# Altium footprint library new-version2.PcbLib: 88 footprints (part 5 of 6)
Each footprint in its own frame and in the unit in brackets; x right, y up, seen from the top. Pads: shape width x height; smd on the part's side, far side on the other; paste and mask are expansions set on the pad; w line width, h text height; cw(c..) or ccw(c..) is an arc to the next point about the centre after c.
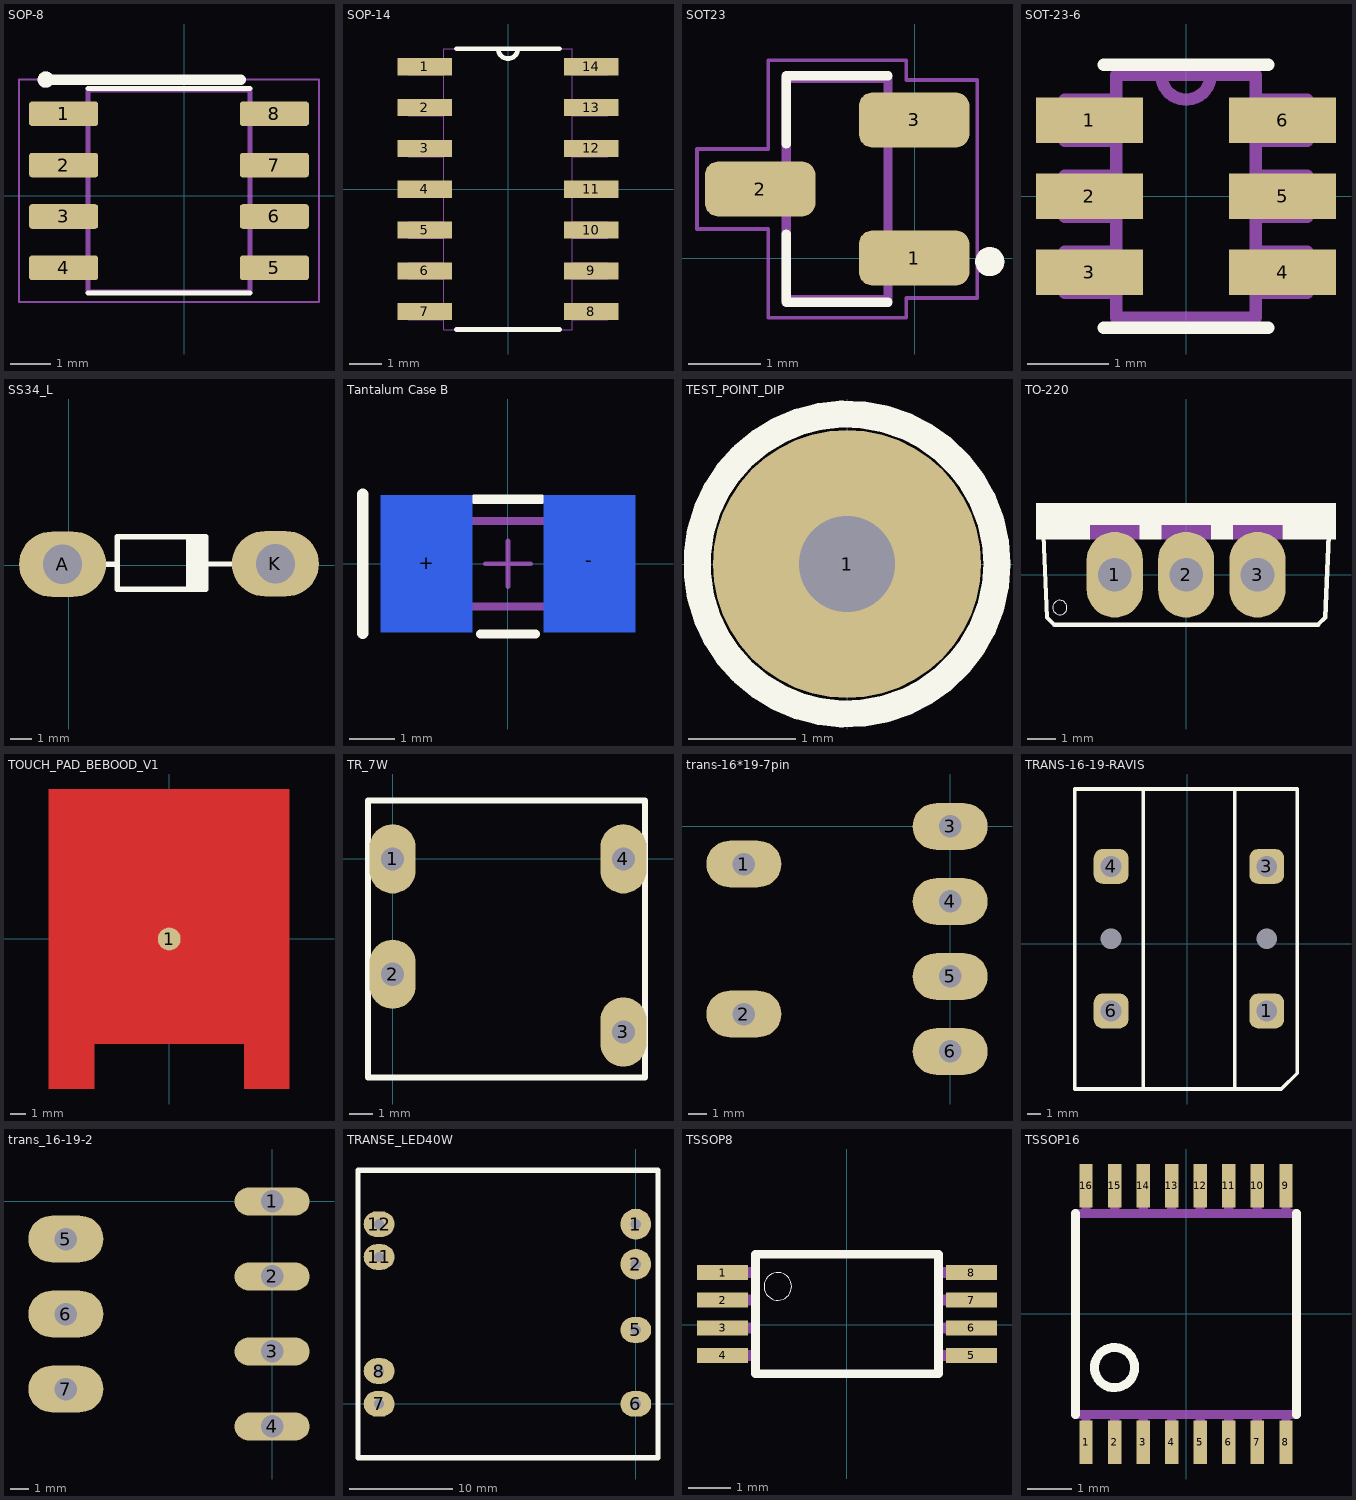
[diagram p4: the footprints below, top view; thin cyan lines are the x and y axes]

## SOP-8 [mm]
pads (8):
  rrect25% 1.71x0.61 smd: 1(-2.986,2.032) 2(-2.986,0.762) 3(-2.986,-0.508) 4(-2.986,-1.778) 5(2.224,-1.778) 6(2.224,-0.508) 7(2.224,0.762) 8(2.224,2.032)
Top Overlay:
  circle w0.2: c-3.429,2.877 r0.1
  lines w0.127: -2.381,-2.403 1.619,-2.403 ; -2.381,2.657 1.619,2.657
  lines w0.254: -3.429,2.877 1.399,2.877
Mechanical 13:
  circle w0.2: c-3.429,2.877 r0.1
  lines w0.127: -2.381,-2.373 -2.381,2.627 1.619,2.627 1.619,-2.373 -2.381,-2.373
Mechanical 15:
  lines w0.05: -4.091,-2.623 -4.091,2.877 3.329,2.877 3.329,-2.623 -4.091,-2.623
3D body "step_temp.STEP": height 1.75, standoff 0, extent -3.381,-2.323 2.619,2.577

## SOP-14 [mil]
pads (14):
  rect 67x21 smd: 1(-102,150) 2(-102,100) 3(-102,50) 4(-102,0) 5(-102,-50) 6(-102,-100) 7(-102,-150) 8(102,-150) 9(102,-100) 10(102,-50) 11(102,0) 12(102,50) 13(102,100) 14(102,150)
Top Overlay:
  lines w6: -63,-172 63,-172 ; -63,172 -12,172 ; 63,172 12,172 ; -12,172 ccw(c0,172) 12,172 ; -12,172 12,172
Mechanical 13:
  lines w0: -12,172 ccw(c0,172) 12,172 ; -12,172 -79,172 -79,-172 79,-172 79,172 12,172 ; -12,172 12,172 ; -122,-160 -79,-160 -79,-140 -122,-140 -122,-160 ; -122,-110 -79,-110 -79,-90 -122,-90 -122,-110 ; -122,-60 -79,-60 -79,-40 -122,-40 -122,-60 ; -122,-10 -79,-10 -79,10 -122,10 -122,-10 ; -122,40 -79,40 -79,60 -122,60 -122,40 ; -122,90 -79,90 -79,110 -122,110 -122,90 ; -122,140 -79,140 -79,160 -122,160 -122,140 ; 79,-160 122,-160 122,-140 79,-140 79,-160 ; 79,-110 122,-110 122,-90 79,-90 79,-110 ; 79,-60 122,-60 122,-40 79,-40 79,-60 ; 79,-10 122,-10 122,10 79,10 79,-10 ; 79,40 122,40 122,60 79,60 79,40 ; 79,90 122,90 122,110 79,110 79,90 ; 79,140 122,140 122,160 79,160 79,140
3D body "step_temp.STEP": height 68.9, standoff 0, extent -118.11,-170.28 118.11,170.28

## SOT23 [mil]
pads (3):
  rrect50% 60x30 smd: 1(-0.24,0) 2(-83.7,37.4) 3(-0.24,74.8)
Top Overlay:
  circle w7.87: c40.71,-1.97 r3.94
  lines w5: -69.53,12.99 -69.53,-24.02 -14.41,-24.02 ; -69.53,61.81 -69.53,98.82 -14.41,98.82
Mechanical 13:
  circle w7.87: c40.71,-1.97 r3.94
  lines w5: -69.53,-22.44 -14.41,-22.44 -14.41,97.24 -69.53,97.24 -69.53,-22.44
Mechanical 15:
  lines w1.97: -117.95,15.75 -79.37,15.75 -79.37,-32.28 -4.57,-32.28 -4.57,-21.65 34.02,-21.65 34.02,96.46 -4.57,96.46 -4.57,107.09 -79.37,107.09 -79.37,59.06 -117.95,59.06 -117.95,15.75
3D body "SOT23.STEP": height 44.09, standoff 0, extent -85.51,-18.74 7.01,96.22

## SOT-23-6 [mil]
pads (6):
  rect 52x22 smd: 1(-47,37) 2(-47,0) 3(-47,-37) 4(47,-37) 5(47,0) 6(47,37)
Top Overlay:
  lines w6: -40,-64 40,-64 ; -40,64 40,64
Mechanical 13:
  lines w6: -12,59 ccw(c0,59) 12,59 ; -12,59 12,59 ; -12,59 -34,59 -34,-59 34,-59 34,59 12,59 ; -59,-47 -59,-27 -34,-27 -34,-47 -59,-47 ; -59,-10 -59,10 -34,10 -34,-10 -59,-10 ; -59,27 -59,47 -34,47 -34,27 -59,27 ; 34,-47 34,-27 59,-27 59,-47 34,-47 ; 34,-10 34,10 59,10 59,-10 34,-10 ; 34,27 34,47 59,47 59,27 34,27
3D body "step_temp.STEP": height 57.09, standoff 0, extent -55.12,-57.09 55.12,57.09

## SS34_L [mm]
pads (2):
  oval 4x3 hole 1.8: A(-0.276,0.055) K(9.5,0.076)
Top Overlay:
  region: 6.29,1.315 5.401,1.315 5.401,-1.098 6.29,-1.098
  lines w0.254: -0.938,0.055 2.226,0.055 ; 2.988,1.315 2.226,1.315 ; 5.822,0.057 9.5,0.076 ; 2.226,1.315 2.226,-1.098 6.29,-1.098 6.29,1.315 2.226,1.315

## Tantalum Case B [mm]
pads (2):
  rect 2x3 smd far side: +(-1.782,0) -(1.782,0)
Top Overlay:
  lines w0.2: -0.731,1.41 0.731,1.41 ; -0.604,-1.537 0.604,-1.537
  lines w0.254: -3.175,-1.524 -3.175,1.524
Mechanical 13:
  lines w0.1: -1.7,-0.9 1.7,-0.9 1.7,0.9 -1.7,0.9 -1.7,-0.9
Mechanical 15:
  lines w0.1: -0.5,0 0.5,0 ; 0,-0.5 0,0.5 ; -2,-0.975 2,-0.975 2,0.975 -2,0.975 -2,-0.975

## TEST_POINT_DIP [mm]
pads (1):
  round 2.5 hole 0.9: 1(0,0)
Top Overlay:
  circle w0.254: c0,0 r1.4

## TO-220 [mm]
pads (3):
  oval 2x3.048 hole 1.2: 1(-2.541,-0.001) 2(-0.001,-0.001) 3(2.539,-0.001)
Top Overlay:
  circle w0: c-4.497,-1.169 r0.254
  region: 5.333,1.776 -5.345,1.776 -5.345,2.539 5.333,2.539
  region: -3.43,1.267 -5.341,1.267 -5.341,1.777 -3.43,1.777
  region: -0.89,1.267 -1.655,1.267 -1.655,1.777 -0.89,1.777
  region: 1.65,1.268 0.889,1.268 0.889,1.777 1.65,1.777
  region: 5.333,1.268 3.432,1.268 3.432,1.777 5.333,1.777
  lines w0.152: -5.081,1.396 -4.954,-1.525 -4.7,-1.779 4.698,-1.779 4.952,-1.525 5.079,1.396
Mechanical 13:
  region: -1.652,1.268 -3.434,1.268 -3.434,1.777 -1.652,1.777
  region: 0.888,1.269 -0.89,1.269 -0.89,1.777 0.888,1.777
  region: 3.428,1.269 1.651,1.269 1.651,1.777 3.428,1.777
3D body "TO-220.STEP": height 19.84, standoff -10.19, extent -5.108,-1.827 4.988,2.618

## TOUCH_PAD_BEBOOD_V1 [mil]
pads (1):
  round 60 smd: 1(0,-0.12)
Top Layer:
  region: -196.5,-393.7 -196.5,-275.59 196.34,-275.59 196.34,-393.7 314.69,-393.7 314.68,393.46 -316.02,393.47 -316.02,-393.7

## TR_7W [mm]
pads (4):
  oval 2x3 hole 1: 1(0,0) 2(0,-5) 3(10,-7.5) 4(10,0)
Top Overlay:
  lines w0.254: -1.066,-9.476 10.934,-9.476 10.934,2.529 -1.066,2.529 -1.066,-9.476

## trans-16*19-7pin [mm]
pads (6):
  oval 4x2.5 hole 1.2: 1(-11,-2) 2(-11,-10) 3(0,0) 4(0,-4) 5(0,-8) 6(0,-12)
Bottom Overlay:
  lines w0.254: -12.65,-14 1.35,-14 1.35,2 -12.65,2 -12.65,-14

## TRANS-16-19-RAVIS [mm]
pads (6):
  rrect50% 2.5x2.5 hole 1.5 mask+0: 1(5.715,-4.826) 3(5.715,5.574) 4(-5.485,5.574) 6(-5.485,-4.826)
  rrect50% 0x0 hole 1.5 unplated mask+0: 2(5.715,0.374) 5(-5.485,0.374)
Top Overlay:
  lines w0.254: -3.185,-10.442 -3.185,11.148 ; 3.41,-10.442 3.41,11.148 ; -8.096,-10.442 -8.096,11.148 7.906,11.148 7.906,-9.304 6.767,-10.442 -8.096,-10.442
3D body "User Library-EE-19V10P.x_t": height 19, standoff -4.5, extent -8.03,-10.499 7.97,11.501

## trans_16-19-2 [mm]
pads (7):
  oval 4x1.5 hole 1.2: 1(0,0) 2(0,-4) 3(0,-8) 4(0,-12)
  oval 4x2.5 hole 1.2: 5(-11,-2) 6(-11,-6) 7(-11,-10)
Bottom Overlay:
  lines w0.254: -12.65,-14 1.35,-14 1.35,2 -12.65,2 -12.65,-14

## TRANSE_LED40W [mm]
pads (8):
  round 3 hole 1: 1(0,17.5) 2(0,13.6)
  oval 3x2.5 hole 1: 5(0,7.2) 6(0,0) 7(-25,0) 8(-25,3.2) 11(-25,14.3) 12(-25,17.5)
Top Overlay:
  lines w0.5: -26.476,22.75 2.159,22.75 2.159,-5.25 -27.051,-5.25 -27.051,22.75 1.524,22.75

## TSSOP8 [mm]
pads (8):
  rect 1.2x0.35 smd: 1(-2.925,1.229) 2(-2.925,0.579) 3(-2.925,-0.071) 4(-2.925,-0.721) 5(2.925,-0.721) 6(2.925,-0.071) 7(2.925,0.579) 8(2.925,1.229)
Top Overlay:
  circle w0: c-1.625,0.904 r0.325
  lines w0.203: -2.15,-1.146 2.15,-1.146 2.15,1.654 -2.15,1.654 -2.15,-1.146
Mechanical 13:
  region: -2.2,1.104 -3.2,1.104 -3.2,1.354 -2.2,1.354
  region: -2.2,0.454 -3.201,0.454 -3.201,0.704 -2.2,0.704
  region: -2.2,-0.197 -3.206,-0.197 -3.206,0.054 -2.2,0.054
  region: -2.2,-0.846 -3.201,-0.846 -3.201,-0.596 -2.2,-0.596
  region: 3.2,-0.846 2.201,-0.846 2.201,-0.596 3.2,-0.596
  region: 3.2,-0.196 2.201,-0.196 2.201,0.054 3.2,0.054
  region: 3.2,0.454 2.203,0.454 2.203,0.704 3.2,0.704
  region: 3.2,1.105 2.201,1.105 2.201,1.354 3.2,1.354

## TSSOP16 [mil]
pads (16):
  rect 12x39 smd: 1(-89.57,-114.91) 2(-63.98,-114.91) 3(-38.39,-114.91) 4(-12.8,-114.91) 5(12.8,-114.91) 6(38.39,-114.91) 7(63.98,-114.91) 8(89.57,-114.91) 9(89.57,114.83) 10(63.98,114.83) 11(38.39,114.83) 12(12.8,114.83) 13(-12.8,114.83) 14(-38.39,114.83) 15(-63.98,114.83) 16(-89.57,114.83)
Top Overlay:
  circle w8: c-64,-48.04 r18
  lines w8: -99,-89.91 -99,89.83 ; 99,-89.91 99,89.83
Mechanical 13:
  region: -85.57,89.83 -93.57,89.83 -93.57,122.83 -85.57,122.83
  region: -59.98,89.83 -67.98,89.83 -67.98,122.83 -59.98,122.83
  region: -34.39,89.83 -42.39,89.83 -42.39,122.83 -34.39,122.83
  region: -8.8,89.83 -16.8,89.83 -16.8,122.83 -8.8,122.83
  region: 16.8,89.83 8.8,89.83 8.8,122.83 16.8,122.83
  region: 42.39,89.83 34.39,89.83 34.39,122.83 42.39,122.83
  region: 67.98,89.83 59.98,89.83 59.98,122.83 67.98,122.83
  region: 93.57,89.83 85.57,89.83 85.57,122.83 93.57,122.83
  region: 93.57,-122.91 85.57,-122.91 85.57,-89.91 93.57,-89.91
  region: 67.98,-122.91 59.98,-122.91 59.98,-89.91 67.98,-89.91
  region: 42.39,-122.91 34.39,-122.91 34.39,-89.91 42.39,-89.91
  region: 16.8,-122.91 8.8,-122.91 8.8,-89.91 16.8,-89.91
  region: -8.8,-122.91 -16.8,-122.91 -16.8,-89.91 -8.8,-89.91
  region: -34.39,-122.91 -42.39,-122.91 -42.39,-89.91 -34.39,-89.91
  region: -59.98,-122.91 -67.98,-122.91 -67.98,-89.91 -59.98,-89.91
  region: -85.57,-122.91 -93.57,-122.91 -93.57,-89.91 -85.57,-89.91
  lines w8: -99,-89.91 99,-89.91 ; -99,89.83 99,89.83
3D body "TSSOP16.STEP": height 42.32, standoff -0.98, extent -98.7,-126.6 98.15,125.58